# Altium footprint library ICs_VendorSpecific.PcbLib: 247 footprints (part 11 of 19)
Each footprint in its own frame and in the unit in brackets; x right, y up, seen from the top. Pads: shape width x height; smd on the part's side, far side on the other; paste and mask are expansions set on the pad; w line width, h text height; cw(c..) or ccw(c..) is an arc to the next point about the centre after c.
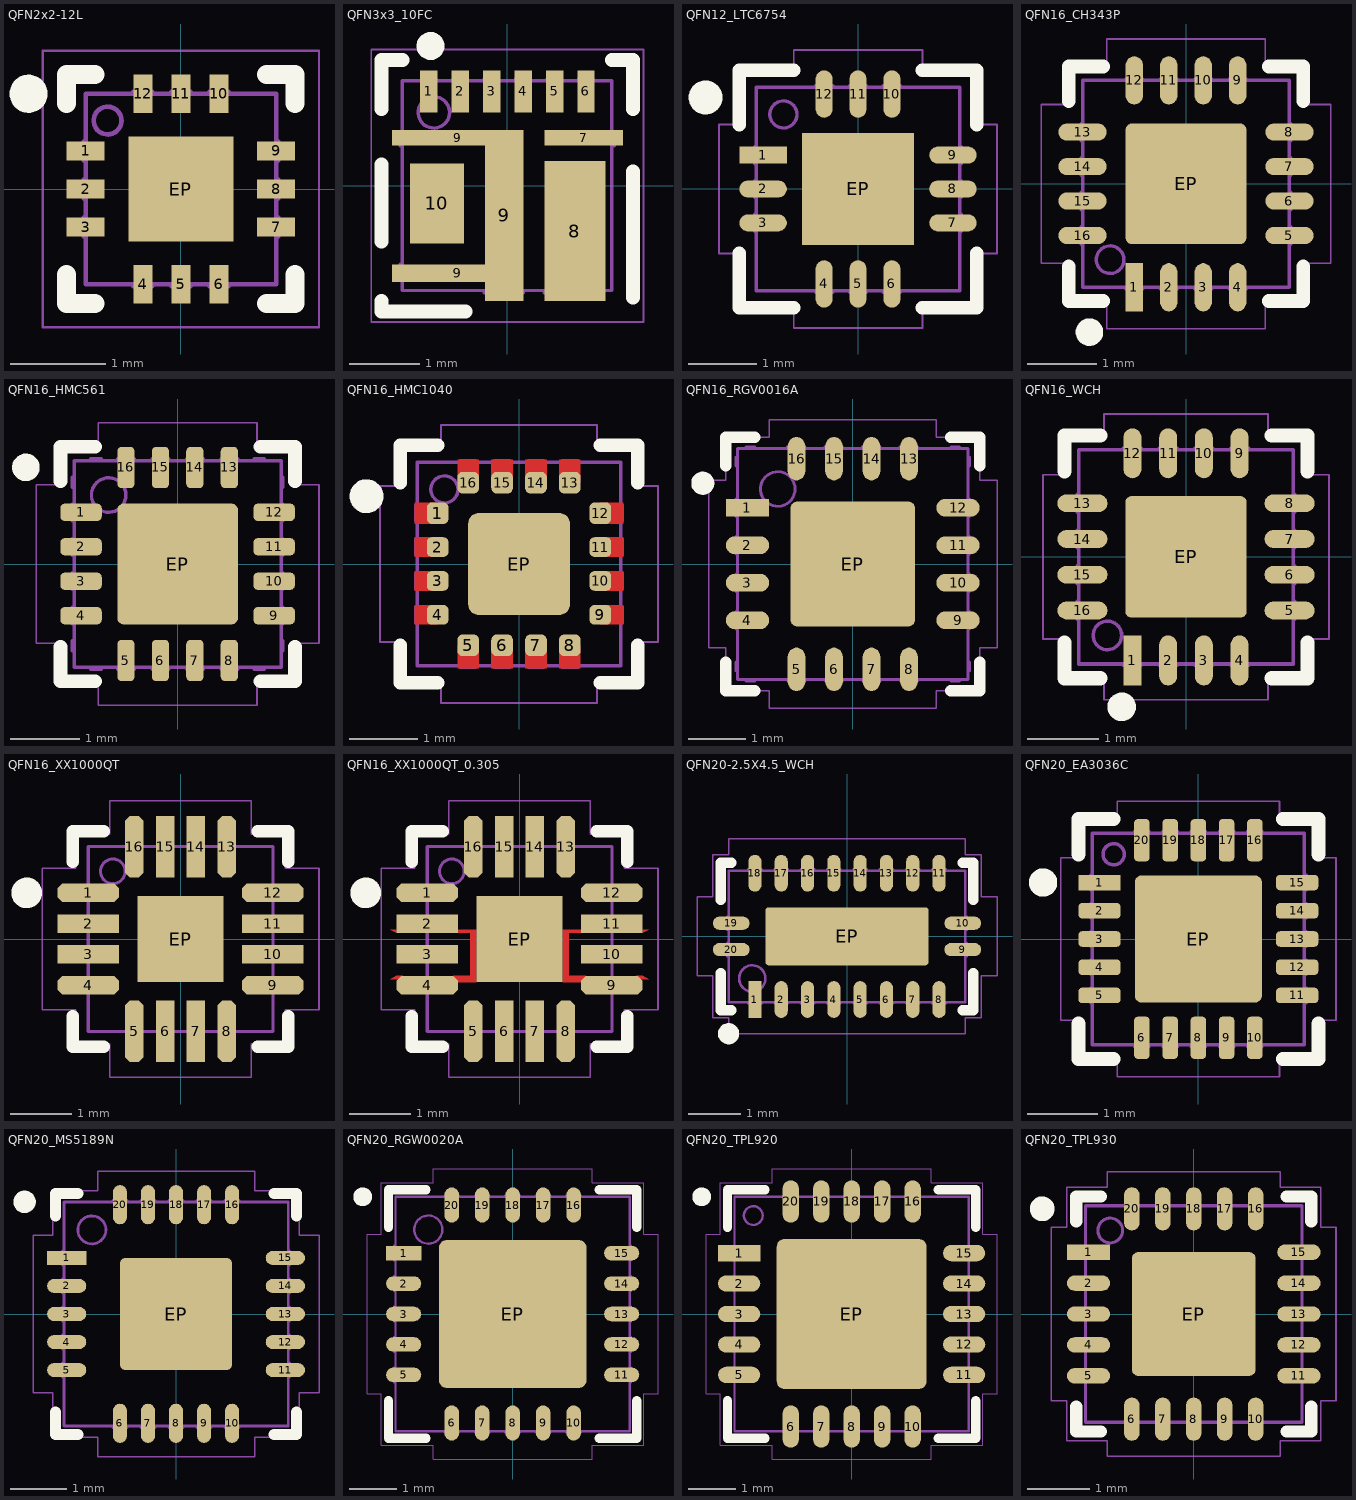
[diagram p10: the footprints below, top view; thin cyan lines are the x and y axes]

## QFN2x2-12L [mm] "QFN, 12 leads, 2mm x 2mm, 0.4mm pitch"
height 0.55
pads (13):
  rect 0.4x0.2 smd paste-0.025 mask+0.05: 1(-1,0.4) 2(-1,0) 3(-1,-0.4) 7(1,-0.4) 8(1,0) 9(1,0.4)
  rect 0.2x0.4 smd paste-0.025 mask+0.05: 4(-0.4,-1) 6(0.4,-1) 10(0.4,1) 11(0,1) 12(-0.4,1)
  rect 0.2x0.4 smd paste+0 mask+0.05: 5(0,-1)
  rect 1.1x1.1 smd paste-0.025 mask+0.05: EP(0,0)
Top Overlay:
  circle w0.2: c-1.6,1 r0.1
  lines w0.2: -1.2,-0.9 -1.2,-1.2 -0.9,-1.2 ; -1.2,0.9 -1.2,1.2 -0.9,1.2 ; 0.9,-1.2 1.2,-1.2 1.2,-0.9 ; 0.9,1.2 1.2,1.2 1.2,0.9
Top Courtyard:
  lines w0.025: -1.45,-1.45 -1.45,1.45 1.45,1.45 1.45,-1.45 -1.45,-1.45
Top Assembly:
  circle w0.05: c-0.77,0.718 r0.145
  lines w0.05: -1,-0.5 -1.02,-0.5 -1.02,-0.3 -1,-0.3 ; -1,-0.1 -1.02,-0.1 -1.02,0.1 -1,0.1 ; -1,0.3 -1.02,0.3 -1.02,0.5 -1,0.5 ; -0.5,-1 -0.5,-1.02 -0.3,-1.02 -0.3,-1 ; -0.5,1 -0.5,1.02 -0.3,1.02 -0.3,1 ; -0.1,-1 -0.1,-1.02 0.1,-1.02 0.1,-1 ; -0.1,1 -0.1,1.02 0.1,1.02 0.1,1 ; 0.3,-1 0.3,-1.02 0.5,-1.02 0.5,-1 ; 0.3,1 0.3,1.02 0.5,1.02 0.5,1 ; 1,-0.5 1.02,-0.5 1.02,-0.3 1,-0.3 ; 1,-0.1 1.02,-0.1 1.02,0.1 1,0.1 ; 1,0.3 1.02,0.3 1.02,0.5 1,0.5 ; -1,-1 -1,1 1,1 1,-1 -1,-1
  text ".Designator" at -2.252,-0.226 h1
3D body "QFN2x2-12L.x_t": height 0.62, standoff 0, extent -1.02,-1.02 1.02,1.02

## QFN3x3_10FC [mm] "Power QFN 3mm x 3mm"
pads (12):
  rect 0.25x0.6 smd paste-0.025 mask+0.05: 1(-1.125,1.35) 2(-0.675,1.35) 3(-0.225,1.35) 4(0.225,1.35) 5(0.675,1.35) 6(1.125,1.35)
  rect 1.122x0.225 smd paste-0.025 mask+0.05: 7(1.093,0.687)
  rect 0.87x2 smd paste-3 mask+0.05: 8(0.967,-0.65)
  rect 1.88x0.25 smd paste-3 mask+0.05: 9(-0.71,-1.255)
  rect 1.88x0.225 smd paste-3 mask+0.05: 9(-0.71,0.687)
  rect 0.555x2.45 smd paste-3 mask+0.05: 9(-0.045,-0.425)
  rect 0.775x1.15 smd paste-3 mask+0.05: 10(-1.01,-0.255)
Top Overlay:
  circle w0.2: c-1.1,2 r0.1
  lines w0.2: -1.8,-1.65 -1.8,-1.8 -0.6,-1.8 ; -1.8,-0.8 -1.8,0.3 ; -1.8,1.1 -1.8,1.8 -1.5,1.8 ; 1.5,1.8 1.8,1.8 1.8,1.1 ; 1.8,-1.6 1.8,0.2
Top Paste:
  rectangle: -1.3,-0.15 -0.7,0.25
  rectangle: -1.3,-0.75 -0.7,-0.35
  rectangle: -0.25,0.35 0.15,0.75
  rectangle: -0.25,-0.25 0.15,0.15
  rectangle: -0.25,-0.85 0.15,-0.45
  rectangle: -0.25,-1.45 0.15,-1.05
  rectangle: 0.65,-0.25 1.3,0.15
  rectangle: 0.65,-0.85 1.3,-0.45
  region: 1.3,-1.05 0.65,-1.05 0.65,-1.45 1.3,-1.45
  rectangle: -1.338,0.588 -0.938,0.788
  rectangle: -0.838,0.588 -0.438,0.788
  rectangle: -1.338,-1.357 -0.938,-1.157
  rectangle: -0.838,-1.357 -0.438,-1.157
Top Courtyard:
  lines w0.025: -1.95,-1.95 1.95,-1.95 1.95,1.95 -1.95,1.95 -1.95,-1.95
Top Assembly:
  circle w0.05: c-1.053,1.049 r0.225
  lines w0.05: -1.503,-1.326 -1.533,-1.326 -1.533,-1.126 -1.503,-1.126 ; -1.503,0.574 -1.533,0.574 -1.533,0.774 -1.503,0.774 ; -1.228,1.499 -1.228,1.529 -1.028,1.529 -1.028,1.499 ; -0.778,1.499 -0.778,1.529 -0.578,1.529 -0.578,1.499 ; -0.328,-1.501 -0.328,-1.531 0.227,-1.531 0.227,-1.501 ; -0.328,1.499 -0.328,1.529 -0.128,1.529 -0.128,1.499 ; 0.122,1.499 0.122,1.529 0.322,1.529 0.322,1.499 ; 0.527,-1.501 0.527,-1.531 1.247,-1.531 1.247,-1.501 ; 0.572,1.499 0.572,1.529 0.772,1.529 0.772,1.499 ; 1.022,1.499 1.022,1.529 1.222,1.529 1.222,1.499 ; 1.497,0.574 1.527,0.574 1.527,0.774 1.497,0.774 ; -1.503,-1.501 1.497,-1.501 1.497,1.499 -1.503,1.499 -1.503,-1.501
  text ".Designator" at -4.511,-0.453 h2
3D body "QFN3x3_10_FC.STEP": height 0.85, standoff 0, extent -1.53,-1.53 1.53,1.53

## QFN12_LTC6754 [mm] "QFN, 12-lead, 3mm x 3mm, 0.5mm pitch"
height 0.75
pads (13):
  rect 0.7x0.25 smd mask+0.05: 1(-1.4,0.5)
  oval 0.7x0.25 smd mask+0.05: 2(-1.4,0) 3(-1.4,-0.5) 7(1.4,-0.5) 8(1.4,0) 9(1.4,0.5)
  oval 0.25x0.7 smd mask+0.05: 4(-0.5,-1.4) 5(0,-1.4) 6(0.5,-1.4) 10(0.5,1.4) 11(0,1.4) 12(-0.5,1.4)
  rect 1.65x1.65 smd paste-1 mask+0.05: EP(0,0)
Top Overlay:
  circle w0.25: c-2.25,1.35 r0.125
  lines w0.2: -1.75,-0.95 -1.75,-1.75 -0.95,-1.75 ; -1.75,0.95 -1.75,1.75 -0.95,1.75 ; 0.95,-1.75 1.75,-1.75 1.75,-0.95 ; 0.95,1.75 1.75,1.75 1.75,0.95
Top Paste:
  region: -0.15,-0.15 -0.75,-0.15 -0.75,-0.75 -0.15,-0.75
  rectangle: 0.15,-0.75 0.75,-0.15
  region: -0.15,0.75 -0.75,0.75 -0.75,0.15 -0.15,0.15
  rectangle: 0.15,0.15 0.75,0.75
Top Courtyard:
  lines w0.025: -2.05,-0.95 -2.05,0.95 -1.8,0.95 -1.8,1.8 -0.95,1.8 -0.95,2.05 0.95,2.05 0.95,1.8 1.8,1.8 1.8,0.95 2.05,0.95 2.05,-0.95 1.8,-0.95 1.8,-1.8 0.95,-1.8 0.95,-2.05 -0.95,-2.05 -0.95,-1.8 -1.8,-1.8 -1.8,-0.95 -2.05,-0.95
Top Assembly:
  circle w0.05: c-1.1,1.1 r0.2
  lines w0.05: -1.5,-0.625 -1.525,-0.625 -1.525,-0.375 -1.5,-0.375 ; -1.5,-0.125 -1.525,-0.125 -1.525,0.125 -1.5,0.125 ; -1.5,0.375 -1.525,0.375 -1.525,0.625 -1.5,0.625 ; -0.625,-1.5 -0.625,-1.525 -0.375,-1.525 -0.375,-1.5 ; -0.625,1.5 -0.625,1.525 -0.375,1.525 -0.375,1.5 ; -0.125,-1.5 -0.125,-1.525 0.125,-1.525 0.125,-1.5 ; -0.125,1.5 -0.125,1.525 0.125,1.525 0.125,1.5 ; 0.375,-1.5 0.375,-1.525 0.625,-1.525 0.625,-1.5 ; 0.375,1.5 0.375,1.525 0.625,1.525 0.625,1.5 ; 1.5,-0.625 1.525,-0.625 1.525,-0.375 1.5,-0.375 ; 1.5,-0.125 1.525,-0.125 1.525,0.125 1.5,0.125 ; 1.5,0.375 1.525,0.375 1.525,0.625 1.5,0.625 ; -1.5,-1.5 -1.5,1.5 1.5,1.5 1.5,-1.5 -1.5,-1.5
  text ".Designator" at -4.511,-0.453 h2
3D body "QFN12_LTC6754.x_t": height 0.8, standoff 0, extent -1.525,-1.525 1.525,1.525

## QFN16_CH343P [mm] "QFN16 3mm x 3mm, 0.5mm pitch"
height 0.75
pads (17):
  rect 0.25x0.7 smd paste+0 mask+0.05: 1(-0.75,-1.5)
  oval 0.25x0.7 smd paste+0 mask+0.05: 2(-0.25,-1.5) 3(0.25,-1.5) 4(0.75,-1.5) 9(0.75,1.5) 10(0.25,1.5) 11(-0.25,1.5) 12(-0.75,1.5)
  oval 0.7x0.25 smd paste+0 mask+0.05: 5(1.5,-0.75) 6(1.5,-0.25) 7(1.5,0.25) 8(1.5,0.75) 13(-1.5,0.75) 14(-1.5,0.25) 15(-1.5,-0.25) 16(-1.5,-0.75)
  rrect10% 1.75x1.75 smd paste-3 mask+0.05: EP(0,0)
Top Overlay:
  circle w0.2: c-1.4,-2.15 r0.1
  lines w0.2: -1.7,-1.2 -1.7,-1.7 -1.2,-1.7 ; -1.7,1.2 -1.7,1.7 -1.2,1.7 ; 1.2,-1.7 1.7,-1.7 1.7,-1.2 ; 1.2,1.7 1.7,1.7 1.7,1.2
Top Paste:
  region: -0.15,0.85 -0.85,0.85 -0.85,0.15 -0.15,0.15
  region: 0.85,0.85 0.15,0.85 0.15,0.15 0.85,0.15
  region: 0.85,-0.15 0.15,-0.15 0.15,-0.85 0.85,-0.85
  region: -0.15,-0.15 -0.85,-0.15 -0.85,-0.85 -0.15,-0.85
Top Courtyard:
  lines w0.025: -2.1,-1.15 -2.1,1.15 -1.7,1.15 -1.7,1.7 -1.15,1.7 -1.15,2.1 1.15,2.1 1.15,1.7 1.7,1.7 1.7,1.15 2.1,1.15 2.1,-1.15 1.7,-1.15 1.7,-1.7 1.15,-1.7 1.15,-2.1 -1.15,-2.1 -1.15,-1.7 -1.7,-1.7 -1.7,-1.15 -2.1,-1.15
Top Assembly:
  circle w0.05: c-1.1,-1.1 r0.2
  lines w0.05: -1.5,-0.875 -1.52,-0.875 -1.52,-0.625 -1.5,-0.625 ; -1.5,-0.375 -1.52,-0.375 -1.52,-0.125 -1.5,-0.125 ; -1.5,0.125 -1.52,0.125 -1.52,0.375 -1.5,0.375 ; -1.5,0.625 -1.52,0.625 -1.52,0.875 -1.5,0.875 ; -0.875,-1.5 -0.875,-1.52 -0.625,-1.52 -0.625,-1.5 ; -0.875,1.5 -0.875,1.52 -0.625,1.52 -0.625,1.5 ; -0.375,-1.5 -0.375,-1.52 -0.125,-1.52 -0.125,-1.5 ; -0.375,1.5 -0.375,1.52 -0.125,1.52 -0.125,1.5 ; 0.125,-1.5 0.125,-1.52 0.375,-1.52 0.375,-1.5 ; 0.125,1.5 0.125,1.52 0.375,1.52 0.375,1.5 ; 0.625,-1.5 0.625,-1.52 0.875,-1.52 0.875,-1.5 ; 0.625,1.5 0.625,1.52 0.875,1.52 0.875,1.5 ; 1.5,-0.875 1.52,-0.875 1.52,-0.625 1.5,-0.625 ; 1.5,-0.375 1.52,-0.375 1.52,-0.125 1.5,-0.125 ; 1.5,0.125 1.52,0.125 1.52,0.375 1.5,0.375 ; 1.5,0.625 1.52,0.625 1.52,0.875 1.5,0.875 ; -1.5,-1.5 -1.5,1.5 1.5,1.5 1.5,-1.5 -1.5,-1.5
  text ".Designator" at -3.378,-0.339 h1.5
3D body "QFN16_CH343P.x_t": height 0.77, standoff 0, extent -1.52,-1.52 1.52,1.52

## QFN16_HMC561 [mm] "QFN 16-leads 4mm x 4mm, 0.5mm pitch"
height 0.9
pads (17):
  rrect50% 0.6x0.25 smd paste+0 mask+0.05: 1(-1.4,0.75) 2(-1.4,0.25) 3(-1.4,-0.25) 4(-1.4,-0.75) 9(1.4,-0.75) 10(1.4,-0.25) 11(1.4,0.25) 12(1.4,0.75)
  rrect50% 0.25x0.6 smd paste+0 mask+0.05: 5(-0.75,-1.4) 6(-0.25,-1.4) 7(0.25,-1.4) 8(0.75,-1.4) 13(0.75,1.4) 14(0.25,1.4) 15(-0.25,1.4) 16(-0.75,1.4)
  rrect10% 1.75x1.75 smd paste-3 mask+0.05: EP(0,0)
Top Overlay:
  circle w0.2: c-2.2,1.4 r0.1
  lines w0.2: -1.7,-1.2 -1.7,-1.7 -1.2,-1.7 ; -1.7,1.2 -1.7,1.7 -1.2,1.7 ; 1.2,-1.7 1.7,-1.7 1.7,-1.2 ; 1.2,1.7 1.7,1.7 1.7,1.2
Top Paste:
  rectangle: 0.15,0.15 0.85,0.85
  region: -0.15,0.85 -0.85,0.85 -0.85,0.15 -0.15,0.15
  rectangle: 0.15,-0.85 0.85,-0.15
  region: -0.15,-0.15 -0.85,-0.15 -0.85,-0.85 -0.15,-0.85
Top Courtyard:
  lines w0.025: -2.05,-1.15 -1.75,-1.15 -1.75,-1.75 -1.15,-1.75 -1.15,-2.05 1.15,-2.05 1.15,-1.75 1.75,-1.75 1.75,-1.15 2.05,-1.15 2.05,1.15 1.75,1.15 1.75,1.75 1.15,1.75 1.15,2.05 -1.15,2.05 -1.15,1.75 -1.75,1.75 -1.75,1.15 -2.05,1.15 -2.05,-1.15
Top Assembly:
  circle w0.05: c-1,1 r0.25
  lines w0.05: -1.5,-1.26 -1.525,-1.26 -1.525,-1.11 -1.5,-1.11 ; -1.5,-0.87 -1.525,-0.87 -1.525,-0.63 -1.5,-0.63 ; -1.5,-0.37 -1.525,-0.37 -1.525,-0.13 -1.5,-0.13 ; -1.5,0.13 -1.525,0.13 -1.525,0.37 -1.5,0.37 ; -1.5,0.63 -1.525,0.63 -1.525,0.87 -1.5,0.87 ; -1.5,1.11 -1.525,1.11 -1.525,1.26 -1.5,1.26 ; -1.26,-1.5 -1.26,-1.525 -1.11,-1.525 -1.11,-1.5 ; -1.26,1.5 -1.26,1.525 -1.11,1.525 -1.11,1.5 ; -0.87,-1.5 -0.87,-1.525 -0.63,-1.525 -0.63,-1.5 ; -0.87,1.5 -0.87,1.525 -0.63,1.525 -0.63,1.5 ; -0.37,-1.5 -0.37,-1.525 -0.13,-1.525 -0.13,-1.5 ; -0.37,1.5 -0.37,1.525 -0.13,1.525 -0.13,1.5 ; 0.13,-1.5 0.13,-1.525 0.37,-1.525 0.37,-1.5 ; 0.13,1.5 0.13,1.525 0.37,1.525 0.37,1.5 ; 0.63,-1.5 0.63,-1.525 0.87,-1.525 0.87,-1.5 ; 0.63,1.5 0.63,1.525 0.87,1.525 0.87,1.5 ; 1.11,-1.5 1.11,-1.525 1.26,-1.525 1.26,-1.5 ; 1.11,1.5 1.11,1.525 1.26,1.525 1.26,1.5 ; 1.5,-1.26 1.525,-1.26 1.525,-1.11 1.5,-1.11 ; 1.5,-0.87 1.525,-0.87 1.525,-0.63 1.5,-0.63 ; 1.5,-0.37 1.525,-0.37 1.525,-0.13 1.5,-0.13 ; 1.5,0.13 1.525,0.13 1.525,0.37 1.5,0.37 ; 1.5,0.63 1.525,0.63 1.525,0.87 1.5,0.87 ; 1.5,1.11 1.525,1.11 1.525,1.26 1.5,1.26 ; -1.5,-1.5 -1.5,1.5 1.5,1.5 1.5,-1.5 -1.5,-1.5
  text ".Designator" at -4.511,-0.453 h2
3D body "QFN16_HMC561.x_t": height 0.93, standoff 0.01, extent -1.52,-1.52 1.52,1.52

## QFN16_HMC1040 [mm] "QFN16 3mm x 3mm, 0.5mm pitch"
height 0.9
pads (17):
  rrect50% 0.32x0.32 smd mask+0.05: 1(-1.2,0.75) 5(-0.75,-1.2) 6(-0.25,-1.2) 7(0.25,-1.2) 8(0.75,-1.2) 12(1.2,0.75) 13(0.75,1.2) 14(0.25,1.2) 15(-0.25,1.2) 16(-0.75,1.2)
  rrect50% 0.32x0.29 smd mask+0.05: 2(-1.2,0.25) 3(-1.2,-0.25) 4(-1.2,-0.75) 9(1.2,-0.75) 10(1.2,-0.25) 11(1.2,0.25)
  rrect20% 1.5x1.5 smd paste-5: EP(0,0)
Top Layer:
  region: 1.54,-0.605 1.2,-0.605 1.2,-0.895 1.54,-0.895
  region: 1.54,-0.105 1.2,-0.105 1.2,-0.395 1.54,-0.395
  region: 1.54,0.395 1.2,0.395 1.2,0.105 1.54,0.105
  rectangle: -1.54,-0.895 -1.2,-0.605
  rectangle: -1.54,-0.395 -1.2,-0.105
  rectangle: -1.54,0.105 -1.2,0.395
  rectangle: -1.54,0.59 -1.2,0.91
  region: 0.59,1.54 0.59,1.2 0.91,1.2 0.91,1.54
  region: 0.09,1.54 0.09,1.2 0.41,1.2 0.41,1.54
  region: -0.41,1.54 -0.41,1.2 -0.09,1.2 -0.09,1.54
  region: -0.91,1.54 -0.91,1.2 -0.59,1.2 -0.59,1.54
  region: 1.54,0.91 1.2,0.91 1.2,0.59 1.54,0.59
  region: -0.59,-1.54 -0.59,-1.2 -0.91,-1.2 -0.91,-1.54
  region: -0.09,-1.54 -0.09,-1.2 -0.41,-1.2 -0.41,-1.54
  region: 0.41,-1.54 0.41,-1.2 0.09,-1.2 0.09,-1.54
  region: 0.91,-1.54 0.91,-1.2 0.59,-1.2 0.59,-1.54
Top Overlay:
  circle w0.25: c-2.25,1 r0.125
  lines w0.2: -1.75,-1.2 -1.75,-1.75 -1.2,-1.75 ; -1.75,1.2 -1.75,1.75 -1.2,1.75 ; 1.2,-1.75 1.75,-1.75 1.75,-1.2 ; 1.2,1.75 1.75,1.75 1.75,1.2
Top Paste:
  region: 1.54,0.395 1.19,0.395 1.19,0.105 1.54,0.105
  region: -0.1,-0.1 -0.7,-0.1 -0.7,-0.7 -0.1,-0.7
  region: 0.7,-0.1 0.1,-0.1 0.1,-0.7 0.7,-0.7
  region: -0.1,0.7 -0.7,0.7 -0.7,0.1 -0.1,0.1
  region: 0.7,0.7 0.1,0.7 0.1,0.1 0.7,0.1
  rectangle: -1.54,0.105 -1.19,0.395
  rectangle: -1.54,-0.395 -1.19,-0.105
  rectangle: -1.54,-0.895 -1.19,-0.605
  region: -0.59,-1.55 -0.59,-1.2 -0.91,-1.2 -0.91,-1.55
  region: -0.09,-1.55 -0.09,-1.2 -0.41,-1.2 -0.41,-1.55
  region: 0.41,-1.55 0.41,-1.2 0.09,-1.2 0.09,-1.55
  region: 0.91,-1.55 0.91,-1.2 0.59,-1.2 0.59,-1.55
  region: 1.54,-0.105 1.19,-0.105 1.19,-0.395 1.54,-0.395
  region: 1.55,0.91 1.2,0.91 1.2,0.59 1.55,0.59
  rectangle: -1.55,0.59 -1.2,0.91
  region: 0.09,1.55 0.09,1.2 0.41,1.2 0.41,1.55
  region: -0.41,1.55 -0.41,1.2 -0.09,1.2 -0.09,1.55
  region: -0.91,1.55 -0.91,1.2 -0.59,1.2 -0.59,1.55
  region: 0.59,1.55 0.59,1.2 0.91,1.2 0.91,1.55
  region: 1.55,0.91 1.2,0.91 1.2,0.59 1.55,0.59
  region: 1.54,-0.605 1.19,-0.605 1.19,-0.895 1.54,-0.895
  region: -0.09,-1.55 -0.09,-1.2 -0.41,-1.2 -0.41,-1.55
  region: 0.41,-1.55 0.41,-1.2 0.09,-1.2 0.09,-1.55
  region: 0.91,-1.55 0.91,-1.2 0.59,-1.2 0.59,-1.55
  region: -0.59,-1.55 -0.59,-1.2 -0.91,-1.2 -0.91,-1.55
Top Solder:
  region: 0,0.21 -0.82,0.21 -0.82,-0.21 0,-0.21
  region: -1.2,0.96 -1.7,0.96 -1.7,0.54 -1.2,0.54
  region: -1.2,0.445 -1.7,0.445 -1.7,0.055 -1.2,0.055
  region: -1.2,-0.055 -1.7,-0.055 -1.7,-0.445 -1.2,-0.445
  region: -1.2,-0.555 -1.7,-0.555 -1.7,-0.945 -1.2,-0.945
  region: -0.96,-1.2 -0.96,-1.7 -0.54,-1.7 -0.54,-1.2
  region: -0.46,-1.2 -0.46,-1.7 -0.04,-1.7 -0.04,-1.2
  region: 0.04,-1.2 0.04,-1.7 0.46,-1.7 0.46,-1.2
  region: 0.54,-1.2 0.54,-1.7 0.96,-1.7 0.96,-1.2
  rectangle: 1.2,-0.945 1.7,-0.555
  rectangle: 1.2,-0.445 1.7,-0.055
  rectangle: 1.2,0.055 1.7,0.445
  rectangle: 1.2,0.54 1.7,0.96
  region: 0.96,1.2 0.96,1.7 0.54,1.7 0.54,1.2
  region: 0.46,1.2 0.46,1.7 0.04,1.7 0.04,1.2
  region: -0.04,1.2 -0.04,1.7 -0.46,1.7 -0.46,1.2
  region: -0.54,1.2 -0.54,1.7 -0.96,1.7 -0.96,1.2
Top Courtyard:
  lines w0.025: -2.05,-1.15 -1.7,-1.15 -1.7,-1.7 -1.15,-1.7 -1.15,-2.05 1.15,-2.05 1.15,-1.7 1.7,-1.7 1.7,-1.15 2.05,-1.15 2.05,1.15 1.7,1.15 1.7,1.7 1.15,1.7 1.15,2.05 -1.15,2.05 -1.15,1.7 -1.7,1.7 -1.7,1.15 -2.05,1.15 -2.05,-1.15
Top Assembly:
  circle w0.05: c-1.1,1.1 r0.2
  lines w0.05: -1.5,-0.865 -1.525,-0.865 -1.525,-0.635 -1.5,-0.635 ; -1.5,-0.365 -1.525,-0.365 -1.525,-0.135 -1.5,-0.135 ; -1.5,0.135 -1.525,0.135 -1.525,0.365 -1.5,0.365 ; -1.5,0.635 -1.525,0.635 -1.525,0.865 -1.5,0.865 ; -0.865,-1.5 -0.865,-1.525 -0.635,-1.525 -0.635,-1.5 ; -0.865,1.5 -0.865,1.525 -0.635,1.525 -0.635,1.5 ; -0.365,-1.5 -0.365,-1.525 -0.135,-1.525 -0.135,-1.5 ; -0.365,1.5 -0.365,1.525 -0.135,1.525 -0.135,1.5 ; 0.135,-1.5 0.135,-1.525 0.365,-1.525 0.365,-1.5 ; 0.135,1.5 0.135,1.525 0.365,1.525 0.365,1.5 ; 0.635,-1.5 0.635,-1.525 0.865,-1.525 0.865,-1.5 ; 0.635,1.5 0.635,1.525 0.865,1.525 0.865,1.5 ; 1.5,-0.865 1.525,-0.865 1.525,-0.635 1.5,-0.635 ; 1.5,-0.365 1.525,-0.365 1.525,-0.135 1.5,-0.135 ; 1.5,0.135 1.525,0.135 1.525,0.365 1.5,0.365 ; 1.5,0.635 1.525,0.635 1.525,0.865 1.5,0.865 ; -1.5,-1.5 -1.5,1.5 1.5,1.5 1.5,-1.5 -1.5,-1.5
  text ".Designator" at -3.378,-0.339 h1.5
3D body "QFN16_HMC1040.x_t": height 0.95, standoff 0, extent -1.525,-1.525 1.525,1.525

## QFN16_RGV0016A [mm] "QFN16, 4mm x 4mm TI Reference RGV0016A"
height 1
pads (17):
  rect 0.75x0.305 smd paste-0.025 mask+0.05: 1(-1.825,0.975)
  oval 0.75x0.305 smd paste-0.025 mask+0.05: 2(-1.825,0.325) 3(-1.825,-0.325) 4(-1.825,-0.975) 9(1.825,-0.975) 10(1.825,-0.325) 11(1.825,0.325) 12(1.825,0.975)
  oval 0.305x0.75 smd paste-0.025 mask+0.05: 5(-0.975,-1.825) 6(-0.325,-1.825) 7(0.325,-1.825) 8(0.975,-1.825) 13(0.975,1.825) 14(0.325,1.825) 15(-0.325,1.825) 16(-0.975,1.825)
  rrect10% 2.16x2.16 smd paste-3 mask+0.05: EP(0,0)
Top Overlay:
  circle w0.2: c-2.6,1.4 r0.1
  lines w0.2: -2.2,-1.7 -2.2,-2.2 -1.7,-2.2 ; -2.2,1.7 -2.2,2.2 -1.7,2.2 ; 1.7,-2.2 2.2,-2.2 2.2,-1.7 ; 1.7,2.2 2.2,2.2 2.2,1.7
Top Paste:
  region: -0.15,-0.15 -0.95,-0.15 -0.95,-0.95 -0.15,-0.95
  region: 0.95,-0.15 0.15,-0.15 0.15,-0.95 0.95,-0.95
  region: 0.95,0.95 0.15,0.95 0.15,0.15 0.95,0.15
  region: -0.15,0.95 -0.95,0.95 -0.95,0.15 -0.15,0.15
Top Courtyard:
  lines w0.025: -2.5,-1.45 -2.5,1.45 -2.2,1.45 -2.2,2.2 -1.45,2.2 -1.45,2.5 1.45,2.5 1.45,2.2 2.2,2.2 2.2,1.45 2.5,1.45 2.5,-1.45 2.2,-1.45 2.2,-2.2 1.45,-2.2 1.45,-2.5 -1.45,-2.5 -1.45,-2.2 -2.2,-2.2 -2.2,-1.45 -2.5,-1.45
Top Assembly:
  circle w0.05: c-1.3,1.3 r0.3
  lines w0.05: -2,-1.85 -2.025,-1.85 -2.025,-1.7 -2,-1.7 ; -2,-1.125 -2.025,-1.125 -2.025,-0.825 -2,-0.825 ; -2,-0.475 -2.025,-0.475 -2.025,-0.175 -2,-0.175 ; -2,0.175 -2.025,0.175 -2.025,0.475 -2,0.475 ; -2,0.825 -2.025,0.825 -2.025,1.125 -2,1.125 ; -2,1.7 -2.025,1.7 -2.025,1.85 -2,1.85 ; -1.85,-2 -1.85,-2.025 -1.7,-2.025 -1.7,-2 ; -1.85,2 -1.85,2.025 -1.7,2.025 -1.7,2 ; -1.135,2 -1.135,2.025 -0.825,2.025 -0.825,2 ; -1.125,-2 -1.125,-2.025 -0.825,-2.025 -0.825,-2 ; -0.485,2 -0.485,2.025 -0.175,2.025 -0.175,2 ; -0.475,-2 -0.475,-2.025 -0.175,-2.025 -0.175,-2 ; 0.165,2 0.165,2.025 0.475,2.025 0.475,2 ; 0.175,-2 0.175,-2.025 0.475,-2.025 0.475,-2 ; 0.815,2 0.815,2.025 1.125,2.025 1.125,2 ; 0.825,-2 0.825,-2.025 1.125,-2.025 1.125,-2 ; 1.7,-2 1.7,-2.025 1.85,-2.025 1.85,-2 ; 1.7,2 1.7,2.025 1.85,2.025 1.85,2 ; 2,-1.85 2.025,-1.85 2.025,-1.7 2,-1.7 ; 2,-1.125 2.025,-1.125 2.025,-0.825 2,-0.825 ; 2,-0.475 2.025,-0.475 2.025,-0.175 2,-0.175 ; 2,0.175 2.025,0.175 2.025,0.475 2,0.475 ; 2,0.825 2.025,0.825 2.025,1.125 2,1.125 ; 2,1.7 2.025,1.7 2.025,1.85 2,1.85 ; -2,-2 2,-2 2,2 -2,2 -2,-2
  text ".Designator" at -4.511,-0.453 h2
3D body "RGV0016A.x_t": height 1.05, standoff 0, extent -2.025,-2.025 2.025,2.025

## QFN16_WCH [mm] "QFN16 3mm x 3mm, 0.5mm pitch"
height 0.65
pads (17):
  rect 0.25x0.7 smd paste+0 mask+0.05: 1(-0.75,-1.45)
  oval 0.25x0.7 smd paste+0 mask+0.05: 2(-0.25,-1.45) 3(0.25,-1.45) 4(0.75,-1.45) 9(0.75,1.45) 10(0.25,1.45) 11(-0.25,1.45) 12(-0.75,1.45)
  oval 0.7x0.25 smd paste+0 mask+0.05: 5(1.45,-0.75) 6(1.45,-0.25) 7(1.45,0.25) 8(1.45,0.75) 13(-1.45,0.75) 14(-1.45,0.25) 15(-1.45,-0.25) 16(-1.45,-0.75)
  rrect10% 1.7x1.7 smd paste-3 mask+0.05: EP(0,0)
Top Overlay:
  circle w0.2: c-0.9,-2.1 r0.1
  lines w0.2: -1.7,-1.2 -1.7,-1.7 -1.2,-1.7 ; -1.7,1.2 -1.7,1.7 -1.2,1.7 ; 1.2,-1.7 1.7,-1.7 1.7,-1.2 ; 1.2,1.7 1.7,1.7 1.7,1.2
Top Paste:
  region: -0.15,0.85 -0.85,0.85 -0.85,0.15 -0.15,0.15
  region: 0.85,0.85 0.15,0.85 0.15,0.15 0.85,0.15
  region: 0.85,-0.15 0.15,-0.15 0.15,-0.85 0.85,-0.85
  region: -0.15,-0.15 -0.85,-0.15 -0.85,-0.85 -0.15,-0.85
Top Courtyard:
  lines w0.025: -2,-1.15 -2,1.15 -1.7,1.15 -1.7,1.7 -1.15,1.7 -1.15,2 1.15,2 1.15,1.7 1.7,1.7 1.7,1.15 2,1.15 2,-1.15 1.7,-1.15 1.7,-1.7 1.15,-1.7 1.15,-2 -1.15,-2 -1.15,-1.7 -1.7,-1.7 -1.7,-1.15 -2,-1.15
Top Assembly:
  circle w0.05: c-1.1,-1.1 r0.2
  lines w0.05: -1.5,-0.875 -1.52,-0.875 -1.52,-0.625 -1.5,-0.625 ; -1.5,-0.375 -1.52,-0.375 -1.52,-0.125 -1.5,-0.125 ; -1.5,0.125 -1.52,0.125 -1.52,0.375 -1.5,0.375 ; -1.5,0.625 -1.52,0.625 -1.52,0.875 -1.5,0.875 ; -0.875,-1.5 -0.875,-1.52 -0.625,-1.52 -0.625,-1.5 ; -0.875,1.5 -0.875,1.52 -0.625,1.52 -0.625,1.5 ; -0.375,-1.5 -0.375,-1.52 -0.125,-1.52 -0.125,-1.5 ; -0.375,1.5 -0.375,1.52 -0.125,1.52 -0.125,1.5 ; 0.125,-1.5 0.125,-1.52 0.375,-1.52 0.375,-1.5 ; 0.125,1.5 0.125,1.52 0.375,1.52 0.375,1.5 ; 0.625,-1.5 0.625,-1.52 0.875,-1.52 0.875,-1.5 ; 0.625,1.5 0.625,1.52 0.875,1.52 0.875,1.5 ; 1.5,-0.875 1.52,-0.875 1.52,-0.625 1.5,-0.625 ; 1.5,-0.375 1.52,-0.375 1.52,-0.125 1.5,-0.125 ; 1.5,0.125 1.52,0.125 1.52,0.375 1.5,0.375 ; 1.5,0.625 1.52,0.625 1.52,0.875 1.5,0.875 ; -1.5,-1.5 -1.5,1.5 1.5,1.5 1.5,-1.5 -1.5,-1.5
  text ".Designator" at -3.378,-0.339 h1.5
3D body "QFN16-3x3(WCH).x_t": height 0.67, standoff 0, extent -1.52,-1.52 1.52,1.52

## QFN16_XX1000QT [mm] "QFN16 3mm x 3mm, 0.5mm pitch"
height 0.9
pads (17):
  oct 1x0.3 smd mask+0.04: 1(-1.5,0.75) 4(-1.5,-0.75) 9(1.5,-0.75) 12(1.5,0.75)
  rect 1x0.3 smd mask+0.04: 2(-1.5,0.25) 3(-1.5,-0.25) 10(1.5,-0.25) 11(1.5,0.25)
  oct 0.3x1 smd mask+0.04: 5(-0.75,-1.5) 8(0.75,-1.5) 13(0.75,1.5) 16(-0.75,1.5)
  rect 0.3x1 smd mask+0.04: 6(-0.25,-1.5) 7(0.25,-1.5) 14(0.25,1.5) 15(-0.25,1.5)
  rect 1.4x1.4 smd paste-5 mask+0.06: EP(0,0)
Top Overlay:
  circle w0.25: c-2.5,0.75 r0.125
  lines w0.2: -1.75,-1.25 -1.75,-1.75 -1.25,-1.75 ; -1.75,1.25 -1.75,1.75 -1.25,1.75 ; 1.25,-1.75 1.75,-1.75 1.75,-1.25 ; 1.25,1.75 1.75,1.75 1.75,1.25
Top Paste:
  region: -0.1,-0.1 -0.7,-0.1 -0.7,-0.7 -0.1,-0.7
  region: 0.7,-0.1 0.1,-0.1 0.1,-0.7 0.7,-0.7
  region: -0.1,0.7 -0.7,0.7 -0.7,0.1 -0.1,0.1
  region: 0.7,0.7 0.1,0.7 0.1,0.1 0.7,0.1
Top Courtyard:
  lines w0.025: -2.25,-1.15 -2.25,1.15 -1.7,1.15 -1.7,1.7 -1.15,1.7 -1.15,2.25 1.15,2.25 1.15,1.7 1.7,1.7 1.7,1.15 2.25,1.15 2.25,-1.15 1.7,-1.15 1.7,-1.7 1.15,-1.7 1.15,-2.25 -1.15,-2.25 -1.15,-1.7 -1.7,-1.7 -1.7,-1.15 -2.25,-1.15
Top Assembly:
  circle w0.05: c-1.1,1.1 r0.2
  lines w0.05: -1.5,-0.875 -1.52,-0.875 -1.52,-0.625 -1.5,-0.625 ; -1.5,-0.375 -1.52,-0.375 -1.52,-0.125 -1.5,-0.125 ; -1.5,0.125 -1.52,0.125 -1.52,0.375 -1.5,0.375 ; -1.5,0.625 -1.52,0.625 -1.52,0.875 -1.5,0.875 ; -0.875,-1.5 -0.875,-1.52 -0.625,-1.52 -0.625,-1.5 ; -0.875,1.5 -0.875,1.52 -0.625,1.52 -0.625,1.5 ; -0.375,-1.5 -0.375,-1.52 -0.125,-1.52 -0.125,-1.5 ; -0.375,1.5 -0.375,1.52 -0.125,1.52 -0.125,1.5 ; 0.125,-1.5 0.125,-1.52 0.375,-1.52 0.375,-1.5 ; 0.125,1.5 0.125,1.52 0.375,1.52 0.375,1.5 ; 0.625,-1.5 0.625,-1.52 0.875,-1.52 0.875,-1.5 ; 0.625,1.5 0.625,1.52 0.875,1.52 0.875,1.5 ; 1.5,-0.875 1.52,-0.875 1.52,-0.625 1.5,-0.625 ; 1.5,-0.375 1.52,-0.375 1.52,-0.125 1.5,-0.125 ; 1.5,0.125 1.52,0.125 1.52,0.375 1.5,0.375 ; 1.5,0.625 1.52,0.625 1.52,0.875 1.5,0.875 ; -1.5,-1.5 -1.5,1.5 1.5,1.5 1.5,-1.5 -1.5,-1.5
  text ".Designator" at -2.815,-0.283 h1.25
3D body "XX1000-QT.x_t": height 1, standoff 0.08, extent -1.52,-1.52 1.52,1.52

## QFN16_XX1000QT_0.305 [mm] "QFN16 3mm x 3mm, 0.5mm pitch"
height 0.9
pads (17):
  oct 1x0.3 smd mask+0.04: 1(-1.5,0.75) 4(-1.5,-0.75) 9(1.5,-0.75) 12(1.5,0.75)
  rect 1x0.3 smd mask+0.04: 2(-1.5,0.25) 3(-1.5,-0.25) 10(1.5,-0.25) 11(1.5,0.25)
  oct 0.3x1 smd mask+0.04: 5(-0.75,-1.5) 8(0.75,-1.5) 13(0.75,1.5) 16(-0.75,1.5)
  rect 0.3x1 smd mask+0.04: 6(-0.25,-1.5) 7(0.25,-1.5) 14(0.25,1.5) 15(-0.25,1.5)
  rect 1.4x1.4 smd paste-5 mask+0.06: EP(0,0)
Top Layer:
  region: 1,0.1 0.8,0.1 0.8,-0.6 1.075,-0.6 1.075,-0.7 0.7,-0.7 0.7,0.151 0.7,0.15 1,0.15
  region: -1,0.1 -0.8,0.1 -0.8,-0.6 -1.075,-0.6 -1.075,-0.7 -0.7,-0.7 -0.7,0.151 -0.7,0.15 -1,0.15
  region: 2,0.1 2,0.151 2.101,0.151
  region: 2,-0.6 1.9,-0.6 1.9,-0.651 2,-0.651 2.101,-0.651
  region: -2,-0.6 -1.9,-0.6 -1.9,-0.651 -2,-0.651 -2.101,-0.651
  region: -2,0.1 -2,0.151 -2.101,0.151
Top Overlay:
  circle w0.25: c-2.5,0.75 r0.125
  lines w0.2: -1.75,-1.25 -1.75,-1.75 -1.25,-1.75 ; -1.75,1.25 -1.75,1.75 -1.25,1.75 ; 1.25,-1.75 1.75,-1.75 1.75,-1.25 ; 1.25,1.75 1.75,1.75 1.75,1.25
Top Paste:
  region: 0.7,0.7 0.1,0.7 0.1,0.1 0.7,0.1
  region: -0.1,0.7 -0.7,0.7 -0.7,0.1 -0.1,0.1
  region: 0.7,-0.1 0.1,-0.1 0.1,-0.7 0.7,-0.7
  region: -0.1,-0.1 -0.7,-0.1 -0.7,-0.7 -0.1,-0.7
Top Courtyard:
  lines w0.025: -2.25,-1.15 -1.7,-1.15 -1.7,-1.7 -1.15,-1.7 -1.15,-2.25 1.15,-2.25 1.15,-1.7 1.7,-1.7 1.7,-1.15 2.25,-1.15 2.25,1.15 1.7,1.15 1.7,1.7 1.15,1.7 1.15,2.25 -1.15,2.25 -1.15,1.7 -1.7,1.7 -1.7,1.15 -2.25,1.15 -2.25,-1.15
Top Assembly:
  circle w0.05: c-1.1,1.1 r0.2
  lines w0.05: -1.5,-0.875 -1.52,-0.875 -1.52,-0.625 -1.5,-0.625 ; -1.5,-0.375 -1.52,-0.375 -1.52,-0.125 -1.5,-0.125 ; -1.5,0.125 -1.52,0.125 -1.52,0.375 -1.5,0.375 ; -1.5,0.625 -1.52,0.625 -1.52,0.875 -1.5,0.875 ; -0.875,-1.5 -0.875,-1.52 -0.625,-1.52 -0.625,-1.5 ; -0.875,1.5 -0.875,1.52 -0.625,1.52 -0.625,1.5 ; -0.375,-1.5 -0.375,-1.52 -0.125,-1.52 -0.125,-1.5 ; -0.375,1.5 -0.375,1.52 -0.125,1.52 -0.125,1.5 ; 0.125,-1.5 0.125,-1.52 0.375,-1.52 0.375,-1.5 ; 0.125,1.5 0.125,1.52 0.375,1.52 0.375,1.5 ; 0.625,-1.5 0.625,-1.52 0.875,-1.52 0.875,-1.5 ; 0.625,1.5 0.625,1.52 0.875,1.52 0.875,1.5 ; 1.5,-0.875 1.52,-0.875 1.52,-0.625 1.5,-0.625 ; 1.5,-0.375 1.52,-0.375 1.52,-0.125 1.5,-0.125 ; 1.5,0.125 1.52,0.125 1.52,0.375 1.5,0.375 ; 1.5,0.625 1.52,0.625 1.52,0.875 1.5,0.875 ; -1.5,-1.5 1.5,-1.5 1.5,1.5 -1.5,1.5 -1.5,-1.5
  text ".Designator" at -2.815,-0.283 h1.25
3D body "XX1000-QT.x_t": height 1, standoff 0.08, extent -1.52,-1.52 1.52,1.52

## QFN20-2.5X4.5_WCH [mm] "QFN 2.5mm x 4.5mm, 0.5mm pitch"
height 0.75
pads (21):
  rect 0.25x0.7 smd paste-0.025 mask+0.05: 1(-1.75,-1.2)
  oval 0.25x0.7 smd paste-0.025 mask+0.05: 2(-1.25,-1.2) 3(-0.75,-1.2) 4(-0.25,-1.2) 5(0.25,-1.2) 6(0.75,-1.2) 7(1.25,-1.2) 8(1.75,-1.2) 11(1.75,1.2) 12(1.25,1.2) 13(0.75,1.2) 14(0.25,1.2) 15(-0.25,1.2) 16(-0.75,1.2) 17(-1.25,1.2) 18(-1.75,1.2)
  oval 0.7x0.25 smd paste-0.025 mask+0.05: 9(2.2,-0.25) 10(2.2,0.25) 19(-2.2,0.25) 20(-2.2,-0.25)
  rrect10% 3.1x1.1 smd paste-3 mask+0.05: EP(0,0)
Top Overlay:
  circle w0.2: c-2.25,-1.85 r0.1
  lines w0.2: -2.4,-0.7 -2.4,-1.4 -2.2,-1.4 ; -2.4,0.7 -2.4,1.4 -2.2,1.4 ; 2.2,-1.4 2.4,-1.4 2.4,-0.7 ; 2.2,1.4 2.4,1.4 2.4,0.7
Top Paste:
  region: -0.15,0.5 -0.65,0.5 -0.65,-0.5 -0.15,-0.5
  region: -0.95,0.5 -1.45,0.5 -1.45,-0.5 -0.95,-0.5
  region: 0.65,0.5 0.15,0.5 0.15,-0.5 0.65,-0.5
  region: 1.45,0.5 0.95,0.5 0.95,-0.5 1.45,-0.5
Top Courtyard:
  lines w0.025: -2.85,-0.75 -2.55,-0.75 -2.55,-1.55 -2.25,-1.55 -2.25,-1.85 2.25,-1.85 2.25,-1.55 2.55,-1.55 2.55,-0.75 2.85,-0.75 2.85,0.75 2.55,0.75 2.55,1.55 2.25,1.55 2.25,1.85 -2.25,1.85 -2.25,1.55 -2.55,1.55 -2.55,0.75 -2.85,0.75 -2.85,-0.75
Top Assembly:
  circle w0.05: c-1.8,-0.8 r0.25
  lines w0.05: -2.27,-0.125 -2.25,-0.125 ; -2.25,-0.375 -2.27,-0.375 -2.27,-0.125 -2.25,-0.125 ; -2.25,0.125 -2.27,0.125 -2.27,0.375 -2.25,0.375 ; -1.875,-1.25 -1.875,-1.27 -1.625,-1.27 -1.625,-1.25 ; -1.875,1.25 -1.875,1.27 -1.625,1.27 -1.625,1.25 ; -1.375,-1.25 -1.375,-1.27 -1.125,-1.27 -1.125,-1.25 ; -1.375,1.25 -1.375,1.27 -1.125,1.27 -1.125,1.25 ; -0.875,-1.25 -0.875,-1.27 -0.625,-1.27 -0.625,-1.25 ; -0.875,1.25 -0.875,1.27 -0.625,1.27 -0.625,1.25 ; -0.375,-1.25 -0.375,-1.27 -0.125,-1.27 -0.125,-1.25 ; -0.375,1.25 -0.375,1.27 -0.125,1.27 -0.125,1.25 ; 0.125,-1.25 0.125,-1.27 0.375,-1.27 0.375,-1.25 ; 0.125,1.25 0.125,1.27 0.375,1.27 0.375,1.25 ; 0.625,-1.25 0.625,-1.27 0.875,-1.27 0.875,-1.25 ; 0.625,1.25 0.625,1.27 0.875,1.27 0.875,1.25 ; 1.125,-1.25 1.125,-1.27 1.375,-1.27 1.375,-1.25 ; 1.125,1.25 1.125,1.27 1.375,1.27 1.375,1.25 ; 1.625,-1.25 1.625,-1.27 1.875,-1.27 1.875,-1.25 ; 1.625,1.25 1.625,1.27 1.875,1.27 1.875,1.25 ; 2.25,-0.375 2.27,-0.375 2.27,-0.125 2.25,-0.125 ; 2.25,-0.125 2.27,-0.125 ; 2.25,0.125 2.27,0.125 2.27,0.375 2.25,0.375 ; -2.25,-1.25 -2.25,1.25 2.25,1.25 2.25,-1.25 -2.25,-1.25
  text ".Designator" at -2.815,-0.283 h1.25
3D body "QFN20-2.5X4.5_WCH.x_t": height 0.77, standoff 0, extent -2.27,-1.27 2.27,1.27

## QFN20_EA3036C [mm] "Power QFN 3mm x 3mm, 0.4mm pitch"
pads (21):
  rect 0.6x0.22 smd paste-0.025 mask+0.05: 1(-1.4,0.8)
  rrect50% 0.6x0.22 smd paste-0.025 mask+0.05: 2(-1.4,0.4) 3(-1.4,0) 4(-1.4,-0.4) 5(-1.4,-0.8) 11(1.4,-0.8) 12(1.4,-0.4) 13(1.4,0) 14(1.4,0.4) 15(1.4,0.8)
  rrect50% 0.22x0.6 smd paste-0.025 mask+0.05: 6(-0.8,-1.4) 7(-0.4,-1.4) 8(0,-1.4) 9(0.4,-1.4) 10(0.8,-1.4) 16(0.8,1.4) 17(0.4,1.4) 18(0,1.4) 19(-0.4,1.4) 20(-0.8,1.4)
  rrect10% 1.8x1.8 smd paste-3 mask+0.05: EP(0,0)
Top Overlay:
  circle w0.2: c-2.2,0.8 r0.1
  lines w0.2: -1.7,-1.2 -1.7,-1.7 -1.2,-1.7 ; -1.7,1.2 -1.7,1.7 -1.2,1.7 ; 1.2,-1.7 1.7,-1.7 1.7,-1.2 ; 1.2,1.7 1.7,1.7 1.7,1.2
Top Paste:
  region: 0.7,0.7 0.1,0.7 0.1,0.1 0.7,0.1
  region: -0.1,0.7 -0.7,0.7 -0.7,0.1 -0.1,0.1
  region: 0.7,-0.1 0.1,-0.1 0.1,-0.7 0.7,-0.7
  region: -0.1,-0.1 -0.7,-0.1 -0.7,-0.7 -0.1,-0.7
Top Courtyard:
  lines w0.025: -1.95,-1.15 -1.7,-1.15 -1.7,-1.7 -1.15,-1.7 -1.15,-1.95 1.15,-1.95 1.15,-1.7 1.7,-1.7 1.7,-1.15 1.95,-1.15 1.95,1.15 1.7,1.15 1.7,1.7 1.15,1.7 1.15,1.95 -1.15,1.95 -1.15,1.7 -1.7,1.7 -1.7,1.15 -1.95,1.15 -1.95,-1.15
Top Assembly:
  circle w0.05: c-1.2,1.2 r0.15
  lines w0.05: -1.5,-0.9 -1.525,-0.9 -1.525,-0.7 -1.5,-0.7 ; -1.5,-0.5 -1.525,-0.5 -1.525,-0.3 -1.5,-0.3 ; -1.5,-0.1 -1.525,-0.1 -1.525,0.1 -1.5,0.1 ; -1.5,0.3 -1.525,0.3 -1.525,0.5 -1.5,0.5 ; -1.5,0.7 -1.525,0.7 -1.525,0.9 -1.5,0.9 ; -0.9,-1.5 -0.9,-1.525 -0.7,-1.525 -0.7,-1.5 ; -0.9,1.5 -0.9,1.525 -0.7,1.525 -0.7,1.5 ; -0.5,-1.5 -0.5,-1.525 -0.3,-1.525 -0.3,-1.5 ; -0.5,1.5 -0.5,1.525 -0.3,1.525 -0.3,1.5 ; -0.1,-1.5 -0.1,-1.525 0.1,-1.525 0.1,-1.5 ; -0.1,1.5 -0.1,1.525 0.1,1.525 0.1,1.5 ; 0.3,-1.5 0.3,-1.525 0.5,-1.525 0.5,-1.5 ; 0.3,1.5 0.3,1.525 0.5,1.525 0.5,1.5 ; 0.7,-1.5 0.7,-1.525 0.9,-1.525 0.9,-1.5 ; 0.7,1.5 0.7,1.525 0.9,1.525 0.9,1.5 ; 1.5,-0.9 1.525,-0.9 1.525,-0.7 1.5,-0.7 ; 1.5,-0.5 1.525,-0.5 1.525,-0.3 1.5,-0.3 ; 1.5,-0.1 1.525,-0.1 1.525,0.1 1.5,0.1 ; 1.5,0.3 1.525,0.3 1.525,0.5 1.5,0.5 ; 1.5,0.7 1.525,0.7 1.525,0.9 1.5,0.9 ; -1.5,-1.5 -1.5,1.5 1.5,1.5 1.5,-1.5 -1.5,-1.5
  text ".Designator" at -4.511,-0.453 h2
3D body "QFN-20_EA3036C.x_t": height 0.8, standoff 0, extent -1.525,-1.525 1.525,1.525

## QFN20_MS5189N [mm] "QFN 4mm x 4mm, 0.5mm pitch"
height 0.75
pads (21):
  rect 0.7x0.25 smd paste-0.025 mask+0.05: 1(-1.95,1)
  oval 0.7x0.25 smd paste-0.025 mask+0.05: 2(-1.95,0.5) 3(-1.95,0) 4(-1.95,-0.5) 5(-1.95,-1) 11(1.95,-1) 12(1.95,-0.5) 13(1.95,0) 14(1.95,0.5) 15(1.95,1)
  oval 0.25x0.7 smd paste-0.025 mask+0.05: 6(-1,-1.95) 7(-0.5,-1.95) 8(0,-1.95) 9(0.5,-1.95) 10(1,-1.95) 16(1,1.95) 17(0.5,1.95) 18(0,1.95) 19(-0.5,1.95) 20(-1,1.95)
  rrect10% 2x2 smd paste-3 mask+0.05: EP(0,0)
Top Overlay:
  circle w0.2: c-2.7,2 r0.1
  lines w0.2: -2.15,-1.75 -2.15,-2.15 -1.75,-2.15 ; -2.15,1.75 -2.15,2.15 -1.75,2.15 ; 1.75,-2.15 2.15,-2.15 2.15,-1.75 ; 1.75,2.15 2.15,2.15 2.15,1.75
Top Paste:
  region: 0.95,-0.45 0.45,-0.45 0.45,-0.95 0.95,-0.95
  region: -0.45,-0.45 -0.95,-0.45 -0.95,-0.95 -0.45,-0.95
  region: 0.25,-0.45 -0.25,-0.45 -0.25,-0.95 0.25,-0.95
  region: 0.95,0.25 0.45,0.25 0.45,-0.25 0.95,-0.25
  region: 0.95,0.95 0.45,0.95 0.45,0.45 0.95,0.45
  region: -0.45,0.25 -0.95,0.25 -0.95,-0.25 -0.45,-0.25
  region: 0.25,0.25 -0.25,0.25 -0.25,-0.25 0.25,-0.25
  region: -0.45,0.95 -0.95,0.95 -0.95,0.45 -0.45,0.45
  region: 0.25,0.95 -0.25,0.95 -0.25,0.45 0.25,0.45
Top Courtyard:
  lines w0.025: -2.55,-1.4 -2.55,1.4 -2.2,1.4 -2.2,2.2 -1.4,2.2 -1.4,2.55 1.4,2.55 1.4,2.2 2.2,2.2 2.2,1.4 2.55,1.4 2.55,-1.4 2.2,-1.4 2.2,-2.2 1.4,-2.2 1.4,-2.55 -1.4,-2.55 -1.4,-2.2 -2.2,-2.2 -2.2,-1.4 -2.55,-1.4
Top Assembly:
  circle w0.05: c-1.5,1.5 r0.25
  lines w0.05: -2,-1.125 -2.025,-1.125 -2.025,-0.875 -2,-0.875 ; -2,-0.625 -2.025,-0.625 -2.025,-0.375 -2,-0.375 ; -2,-0.125 -2.025,-0.125 -2.025,0.125 -2,0.125 ; -2,0.375 -2.025,0.375 -2.025,0.625 -2,0.625 ; -2,0.875 -2.025,0.875 -2.025,1.125 -2,1.125 ; -1.125,-2 -1.125,-2.025 -0.875,-2.025 -0.875,-2 ; -1.125,2 -1.125,2.025 -0.875,2.025 -0.875,2 ; -0.625,-2 -0.625,-2.025 -0.375,-2.025 -0.375,-2 ; -0.625,2 -0.625,2.025 -0.375,2.025 -0.375,2 ; -0.125,-2 -0.125,-2.025 0.125,-2.025 0.125,-2 ; -0.125,2 -0.125,2.025 0.125,2.025 0.125,2 ; 0.375,-2 0.375,-2.025 0.625,-2.025 0.625,-2 ; 0.375,2 0.375,2.025 0.625,2.025 0.625,2 ; 0.875,-2 0.875,-2.025 1.125,-2.025 1.125,-2 ; 0.875,2 0.875,2.025 1.125,2.025 1.125,2 ; 2,-1.125 2.025,-1.125 2.025,-0.875 2,-0.875 ; 2,-0.625 2.025,-0.625 2.025,-0.375 2,-0.375 ; 2,-0.125 2.025,-0.125 2.025,0.125 2,0.125 ; 2,0.375 2.025,0.375 2.025,0.625 2,0.625 ; 2,0.875 2.025,0.875 2.025,1.125 2,1.125 ; -2,-2 -2,2 2,2 2,-2 -2,-2
  text ".Designator" at -2.815,-0.283 h1.25
3D body "QFN20_Ruimeng.x_t": height 0.8, standoff 0, extent -2.025,-2.025 2.025,2.025

## QFN20_RGW0020A [mm] "QFN20, 5mm x 5mm TI Reference RGW0020A"
height 1
pads (21):
  rect 0.75x0.31 smd paste-0.025 mask+0.05: 1(-2.325,1.3)
  oval 0.75x0.31 smd paste-0.025 mask+0.05: 2(-2.325,0.65) 3(-2.325,0) 4(-2.325,-0.65) 5(-2.325,-1.3) 11(2.325,-1.3) 12(2.325,-0.65) 13(2.325,0) 14(2.325,0.65) 15(2.325,1.3)
  oval 0.31x0.75 smd paste-0.025 mask+0.05: 6(-1.3,-2.325) 7(-0.65,-2.325) 8(0,-2.325) 9(0.65,-2.325) 10(1.3,-2.325) 16(1.3,2.325) 17(0.65,2.325) 18(0,2.325) 19(-0.65,2.325) 20(-1.3,2.325)
  rrect10% 3.15x3.15 smd paste-3 mask+0.05: EP(0,0)
Top Overlay:
  circle w0.2: c-3.2,2.5 r0.1
  lines w0.2: -2.65,-1.85 -2.65,-2.65 -1.85,-2.65 ; -2.65,1.85 -2.65,2.65 -1.85,2.65 ; 1.85,-2.65 2.65,-2.65 2.65,-1.85 ; 1.85,2.65 2.65,2.65 2.65,1.85
Top Paste:
  region: 1.5,-0.9 0.9,-0.9 0.9,-1.5 1.5,-1.5
  region: -0.9,-0.9 -1.5,-0.9 -1.5,-1.5 -0.9,-1.5
  region: -0.1,-0.9 -0.7,-0.9 -0.7,-1.5 -0.1,-1.5
  region: 0.7,-0.9 0.1,-0.9 0.1,-1.5 0.7,-1.5
  region: -0.9,1.5 -1.5,1.5 -1.5,0.9 -0.9,0.9
  region: -0.9,0.7 -1.5,0.7 -1.5,0.1 -0.9,0.1
  region: 1.5,1.5 0.9,1.5 0.9,0.9 1.5,0.9
  region: 0.7,1.5 0.1,1.5 0.1,0.9 0.7,0.9
  region: -0.1,1.5 -0.7,1.5 -0.7,0.9 -0.1,0.9
  region: 1.5,-0.1 0.9,-0.1 0.9,-0.7 1.5,-0.7
  region: 1.5,0.7 0.9,0.7 0.9,0.1 1.5,0.1
  region: -0.9,-0.1 -1.5,-0.1 -1.5,-0.7 -0.9,-0.7
  region: -0.1,-0.1 -0.7,-0.1 -0.7,-0.7 -0.1,-0.7
  region: 0.7,-0.1 0.1,-0.1 0.1,-0.7 0.7,-0.7
  region: 0.7,0.7 0.1,0.7 0.1,0.1 0.7,0.1
  region: -0.1,0.7 -0.7,0.7 -0.7,0.1 -0.1,0.1
Top Courtyard:
  lines w0.025: -3.1,-1.7 -3.1,1.7 -2.8,1.7 -2.8,2.8 -1.7,2.8 -1.7,3.1 1.7,3.1 1.7,2.8 2.8,2.8 2.8,1.7 3.1,1.7 3.1,-1.7 2.8,-1.7 2.8,-2.8 1.7,-2.8 1.7,-3.1 -1.7,-3.1 -1.7,-2.8 -2.8,-2.8 -2.8,-1.7 -3.1,-1.7
Top Assembly:
  circle w0.05: c-1.8,1.8 r0.3
  lines w0.05: -2.5,-1.455 -2.525,-1.455 -2.525,-1.145 -2.5,-1.145 ; -2.5,-0.805 -2.525,-0.805 -2.525,-0.495 -2.5,-0.495 ; -2.5,-0.155 -2.525,-0.155 -2.525,0.155 -2.5,0.155 ; -2.5,0.495 -2.525,0.495 -2.525,0.805 -2.5,0.805 ; -2.5,1.145 -2.525,1.145 -2.525,1.455 -2.5,1.455 ; -1.455,-2.5 -1.455,-2.525 -1.145,-2.525 -1.145,-2.5 ; -1.455,2.5 -1.455,2.525 -1.145,2.525 -1.145,2.5 ; -0.805,-2.5 -0.805,-2.525 -0.495,-2.525 -0.495,-2.5 ; -0.805,2.5 -0.805,2.525 -0.495,2.525 -0.495,2.5 ; -0.155,-2.5 -0.155,-2.525 0.155,-2.525 0.155,-2.5 ; -0.155,2.5 -0.155,2.525 0.155,2.525 0.155,2.5 ; 0.495,-2.5 0.495,-2.525 0.805,-2.525 0.805,-2.5 ; 0.495,2.5 0.495,2.525 0.805,2.525 0.805,2.5 ; 1.145,-2.5 1.145,-2.525 1.455,-2.525 1.455,-2.5 ; 1.145,2.5 1.145,2.525 1.455,2.525 1.455,2.5 ; 2.5,-1.455 2.525,-1.455 2.525,-1.145 2.5,-1.145 ; 2.5,-0.805 2.525,-0.805 2.525,-0.495 2.5,-0.495 ; 2.5,-0.155 2.525,-0.155 2.525,0.155 2.5,0.155 ; 2.5,0.495 2.525,0.495 2.525,0.805 2.5,0.805 ; 2.5,1.145 2.525,1.145 2.525,1.455 2.5,1.455 ; -2.5,-2.5 -2.5,2.5 2.5,2.5 2.5,-2.5 -2.5,-2.5
  text ".Designator" at -3.378,-0.339 h1.5
3D body "RGW0020A.x_t": height 1.05, standoff 0, extent -2.525,-2.525 2.525,2.525

## QFN20_TPL920 [mm] "QFN 5mm x 5mm, 0.65mm pitch"
height 0.8
pads (21):
  rect 0.9x0.35 smd paste-0.025 mask+0.05: 1(-2.4,1.3)
  oval 0.9x0.35 smd paste-0.025 mask+0.05: 2(-2.4,0.65) 3(-2.4,0) 4(-2.4,-0.65) 5(-2.4,-1.3) 11(2.4,-1.3) 12(2.4,-0.65) 13(2.4,0) 14(2.4,0.65) 15(2.4,1.3)
  oval 0.35x0.9 smd paste-0.025 mask+0.05: 6(-1.3,-2.4) 7(-0.65,-2.4) 8(0,-2.4) 9(0.65,-2.4) 10(1.3,-2.4) 16(1.3,2.4) 17(0.65,2.4) 18(0,2.4) 19(-0.65,2.4) 20(-1.3,2.4)
  rrect10% 3.2x3.2 smd paste-3 mask+0.05: EP(0,0)
Top Overlay:
  circle w0.2: c-3.2,2.5 r0.1
  lines w0.2: -2.65,-1.85 -2.65,-2.65 -1.85,-2.65 ; -2.65,1.85 -2.65,2.65 -1.85,2.65 ; 1.85,-2.65 2.65,-2.65 2.65,-1.85 ; 1.85,2.65 2.65,2.65 2.65,1.85
Top Paste:
  region: 1.5,-0.9 0.9,-0.9 0.9,-1.5 1.5,-1.5
  region: -0.9,-0.9 -1.5,-0.9 -1.5,-1.5 -0.9,-1.5
  region: -0.1,-0.9 -0.7,-0.9 -0.7,-1.5 -0.1,-1.5
  region: 0.7,-0.9 0.1,-0.9 0.1,-1.5 0.7,-1.5
  region: -0.9,1.5 -1.5,1.5 -1.5,0.9 -0.9,0.9
  region: -0.9,0.7 -1.5,0.7 -1.5,0.1 -0.9,0.1
  region: 1.5,1.5 0.9,1.5 0.9,0.9 1.5,0.9
  region: 0.7,1.5 0.1,1.5 0.1,0.9 0.7,0.9
  region: -0.1,1.5 -0.7,1.5 -0.7,0.9 -0.1,0.9
  region: 1.5,-0.1 0.9,-0.1 0.9,-0.7 1.5,-0.7
  region: 1.5,0.7 0.9,0.7 0.9,0.1 1.5,0.1
  region: -0.9,-0.1 -1.5,-0.1 -1.5,-0.7 -0.9,-0.7
  region: -0.1,-0.1 -0.7,-0.1 -0.7,-0.7 -0.1,-0.7
  region: 0.7,-0.1 0.1,-0.1 0.1,-0.7 0.7,-0.7
  region: 0.7,0.7 0.1,0.7 0.1,0.1 0.7,0.1
  region: -0.1,0.7 -0.7,0.7 -0.7,0.1 -0.1,0.1
Top Courtyard:
  lines w0.025: -3.1,-1.7 -3.1,1.7 -2.8,1.7 -2.8,2.8 -1.7,2.8 -1.7,3.1 1.7,3.1 1.7,2.8 2.8,2.8 2.8,1.7 3.1,1.7 3.1,-1.7 2.8,-1.7 2.8,-2.8 1.7,-2.8 1.7,-3.1 -1.7,-3.1 -1.7,-2.8 -2.8,-2.8 -2.8,-1.7 -3.1,-1.7
Top Assembly:
  circle w0.05: c-2.1,2.1 r0.2
  lines w0.05: -2.525,-1.375 -2.5,-1.375 ; -2.525,-1.225 -2.5,-1.225 ; -2.525,-0.725 -2.5,-0.725 ; -2.525,-0.575 -2.5,-0.575 ; -2.525,-0.075 -2.5,-0.075 ; -2.525,0.075 -2.5,0.075 ; -2.525,0.575 -2.5,0.575 ; -2.525,0.725 -2.5,0.725 ; -2.525,1.225 -2.5,1.225 ; -2.525,1.375 -2.5,1.375 ; -2.5,-1.45 -2.525,-1.45 -2.525,-1.15 -2.5,-1.15 ; -2.5,-0.8 -2.525,-0.8 -2.525,-0.5 -2.5,-0.5 ; -2.5,-0.15 -2.525,-0.15 -2.525,0.15 -2.5,0.15 ; -2.5,0.5 -2.525,0.5 -2.525,0.8 -2.5,0.8 ; -2.5,1.15 -2.525,1.15 -2.525,1.45 -2.5,1.45 ; -1.45,-2.5 -1.45,-2.525 -1.15,-2.525 -1.15,-2.5 ; -1.45,2.5 -1.45,2.525 -1.15,2.525 -1.15,2.5 ; -1.375,-2.525 -1.375,-2.5 ; -1.375,2.5 -1.375,2.525 ; -1.225,-2.525 -1.225,-2.5 ; -1.225,2.5 -1.225,2.525 ; -0.8,-2.5 -0.8,-2.525 -0.5,-2.525 -0.5,-2.5 ; -0.8,2.5 -0.8,2.525 -0.5,2.525 -0.5,2.5 ; -0.725,-2.525 -0.725,-2.5 ; -0.725,2.5 -0.725,2.525 ; -0.575,-2.525 -0.575,-2.5 ; -0.575,2.5 -0.575,2.525 ; -0.15,-2.5 -0.15,-2.525 0.15,-2.525 0.15,-2.5 ; -0.15,2.5 -0.15,2.525 0.15,2.525 0.15,2.5 ; -0.075,-2.525 -0.075,-2.5 ; -0.075,2.5 -0.075,2.525 ; 0.075,-2.525 0.075,-2.5 ; 0.075,2.5 0.075,2.525 ; 0.5,-2.5 0.5,-2.525 0.8,-2.525 0.8,-2.5 ; 0.5,2.5 0.5,2.525 0.8,2.525 0.8,2.5 ; 0.575,-2.525 0.575,-2.5 ; 0.575,2.5 0.575,2.525 ; 0.725,-2.525 0.725,-2.5 ; 0.725,2.5 0.725,2.525 ; 1.15,-2.5 1.15,-2.525 1.45,-2.525 1.45,-2.5 ; 1.15,2.5 1.15,2.525 1.45,2.525 1.45,2.5 ; 1.225,-2.525 1.225,-2.5 ; 1.225,2.5 1.225,2.525 ; 1.375,-2.525 1.375,-2.5 ; 1.375,2.5 1.375,2.525 ; 2.5,-1.45 2.525,-1.45 2.525,-1.15 2.5,-1.15 ; 2.5,-1.375 2.525,-1.375 ; 2.5,-1.225 2.525,-1.225 ; 2.5,-0.8 2.525,-0.8 2.525,-0.5 2.5,-0.5 ; 2.5,-0.725 2.525,-0.725 ; 2.5,-0.575 2.525,-0.575 ; 2.5,-0.15 2.525,-0.15 2.525,0.15 2.5,0.15 ; 2.5,-0.075 2.525,-0.075 ; 2.5,0.075 2.525,0.075 ; 2.5,0.5 2.525,0.5 2.525,0.8 2.5,0.8 ; 2.5,0.575 2.525,0.575 ; 2.5,0.725 2.525,0.725 ; 2.5,1.15 2.525,1.15 2.525,1.45 2.5,1.45 ; 2.5,1.225 2.525,1.225 ; 2.5,1.375 2.525,1.375 ; -2.5,-2.5 -2.5,2.5 2.5,2.5 2.5,-2.5 -2.5,-2.5
  text ".Designator" at -3.378,-0.339 h1.5
3D body "QFN20_TPL920.x_t": height 0.85, standoff 0, extent -2.525,-2.525 2.525,2.525

## QFN20_TPL930 [mm] "QFN 3.5mm x 3.5mm, 0.5mm pitch"
height 0.8
pads (21):
  rect 0.7x0.25 smd paste-0.025 mask+0.05: 1(-1.7,1)
  oval 0.7x0.25 smd paste-0.025 mask+0.05: 2(-1.7,0.5) 3(-1.7,0) 4(-1.7,-0.5) 5(-1.7,-1) 11(1.7,-1) 12(1.7,-0.5) 13(1.7,0) 14(1.7,0.5) 15(1.7,1)
  oval 0.25x0.7 smd paste-0.025 mask+0.05: 6(-1,-1.7) 7(-0.5,-1.7) 8(0,-1.7) 9(0.5,-1.7) 10(1,-1.7) 16(1,1.7) 17(0.5,1.7) 18(0,1.7) 19(-0.5,1.7) 20(-1,1.7)
  rrect10% 2x2 smd paste-3 mask+0.05: EP(0,0)
Top Overlay:
  circle w0.2: c-2.45,1.7 r0.1
  lines w0.2: -1.9,-1.5 -1.9,-1.9 -1.5,-1.9 ; -1.9,1.5 -1.9,1.9 -1.5,1.9 ; 1.5,-1.9 1.9,-1.9 1.9,-1.5 ; 1.5,1.9 1.9,1.9 1.9,1.5
Top Paste:
  region: 0.25,0.95 -0.25,0.95 -0.25,0.45 0.25,0.45
  region: -0.45,0.95 -0.95,0.95 -0.95,0.45 -0.45,0.45
  region: 0.25,0.25 -0.25,0.25 -0.25,-0.25 0.25,-0.25
  region: -0.45,0.25 -0.95,0.25 -0.95,-0.25 -0.45,-0.25
  region: 0.95,0.95 0.45,0.95 0.45,0.45 0.95,0.45
  region: 0.95,0.25 0.45,0.25 0.45,-0.25 0.95,-0.25
  region: 0.25,-0.45 -0.25,-0.45 -0.25,-0.95 0.25,-0.95
  region: -0.45,-0.45 -0.95,-0.45 -0.95,-0.95 -0.45,-0.95
  region: 0.95,-0.45 0.45,-0.45 0.45,-0.95 0.95,-0.95
Top Courtyard:
  lines w0.025: -2.3,-1.4 -2.05,-1.4 -2.05,-2.05 -1.4,-2.05 -1.4,-2.3 1.4,-2.3 1.4,-2.05 2.05,-2.05 2.05,-1.4 2.3,-1.4 2.3,1.4 2.05,1.4 2.05,2.05 1.4,2.05 1.4,2.3 -1.4,2.3 -1.4,2.05 -2.05,2.05 -2.05,1.4 -2.3,1.4 -2.3,-1.4
Top Assembly:
  circle w0.05: c-1.35,1.35 r0.2
  lines w0.05: -1.75,-1.09 -1.775,-1.09 -1.775,-0.91 -1.75,-0.91 ; -1.75,-0.59 -1.775,-0.59 -1.775,-0.41 -1.75,-0.41 ; -1.75,-0.09 -1.775,-0.09 -1.775,0.09 -1.75,0.09 ; -1.75,0.41 -1.775,0.41 -1.775,0.59 -1.75,0.59 ; -1.75,0.91 -1.775,0.91 -1.775,1.09 -1.75,1.09 ; -1.09,-1.75 -1.09,-1.775 -0.91,-1.775 -0.91,-1.75 ; -1.09,1.75 -1.09,1.775 -0.91,1.775 -0.91,1.75 ; -0.59,-1.75 -0.59,-1.775 -0.41,-1.775 -0.41,-1.75 ; -0.59,1.75 -0.59,1.775 -0.41,1.775 -0.41,1.75 ; -0.09,-1.75 -0.09,-1.775 0.09,-1.775 0.09,-1.75 ; -0.09,1.75 -0.09,1.775 0.09,1.775 0.09,1.75 ; 0.41,-1.75 0.41,-1.775 0.59,-1.775 0.59,-1.75 ; 0.41,1.75 0.41,1.775 0.59,1.775 0.59,1.75 ; 0.91,-1.75 0.91,-1.775 1.09,-1.775 1.09,-1.75 ; 0.91,1.75 0.91,1.775 1.09,1.775 1.09,1.75 ; 1.75,-1.09 1.775,-1.09 1.775,-0.91 1.75,-0.91 ; 1.75,-0.59 1.775,-0.59 1.775,-0.41 1.75,-0.41 ; 1.75,-0.09 1.775,-0.09 1.775,0.09 1.75,0.09 ; 1.75,0.41 1.775,0.41 1.775,0.59 1.75,0.59 ; 1.75,0.91 1.775,0.91 1.775,1.09 1.75,1.09 ; -1.75,-1.75 -1.75,1.75 1.75,1.75 1.75,-1.75 -1.75,-1.75
  text ".Designator" at -2.815,-0.283 h1.25
3D body "QFN20_TPL930.x_t": height 0.85, standoff 0, extent -1.775,-1.775 1.775,1.775